# EAGLE library part IC_MEM_24C32 (library dp_devices.v6)
32-Kb I2C CMOS Serial EEPROM http://www.onsemi.com/pub/Collateral/CAT24C32-D.PDF
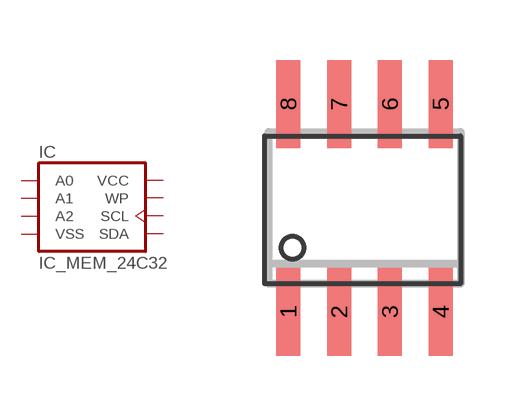
[diagram p152: symbol with the pads of SOIC-8; footprint SOIC-8]

Designator prefix IC

## IC_MEM_24C32  [SOIC-8]
1  A0
2  A1
3  A2
4  VSS  pwr
5  SDA
6  SCL
7  WP
8  VCC  pwr

## Footprint SOIC-8 (pad centres in mm)
smd 0.6 x 2.2: 1 -1.905,-2.6; 2 -0.635,-2.6; 3 0.635,-2.6; 4 1.905,-2.6; 5 1.905,2.6; 6 0.635,2.6; 7 -0.635,2.6; 8 -1.905,2.6